# Altium footprint library MP26028EQ-LF-Z.PcbLib: 3 footprints
Each footprint in its own frame and in the unit in brackets; x right, y up, seen from the top. Pads: shape width x height; smd on the part's side, far side on the other; paste and mask are expansions set on the pad; w line width, h text height; cw(c..) or ccw(c..) is an arc to the next point about the centre after c.
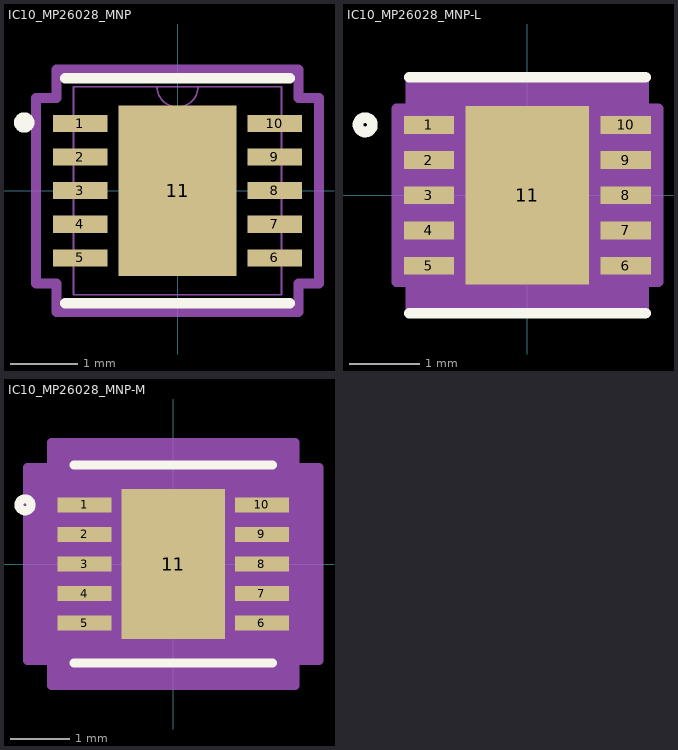
[diagram p0: the footprints below, top view; thin cyan lines are the x and y axes]

## IC10_MP26028_MNP [mil]
pads (11):
  rect 32x10 smd: 1(-57,39.37) 2(-57,19.68) 3(-57,0) 4(-57,-19.68) 5(-57,-39.37) 6(57,-39.37) 7(57,-19.68) 8(57,0) 9(57,19.68) 10(57,39.37)
  rect 69x100 smd: 11(0,0)
Top Overlay:
  circle w6: c-90,40 r3
  lines w6: -66,-66 66,-66 ; -66,66 66,66
Mechanical 13:
  lines w1: -12,61 ccw(c0,61) 12,61 ; -61,-61 -61,61 61,61 61,-61 -61,-61
Mechanical 15:
  lines w6: -83,-54.37 -71,-54.37 -71,-71 71,-71 71,-54.37 83,-54.37 83,54.37 71,54.37 71,71 -71,71 -71,54.37 -83,54.37 -83,-54.37
3D body "IC10_MP26028_MNP.step": height 39.09, standoff 0, extent -60.98,-60.98 60.98,60.98

## IC10_MP26028_MNP-L [mil]
pads (11):
  rect 28x10 smd paste+0 mask+0: 1(-55,39.37) 2(-55,19.68) 3(-55,0) 4(-55,-19.68) 5(-55,-39.37) 6(55,-39.37) 7(55,-19.68) 8(55,0) 9(55,19.68) 10(55,39.37)
  rect 69x100 smd paste+0 mask+0: 11(0,0)
Top Overlay:
  circle w6: c-90.69,39.37 r4
  lines w6: -66,-66 66,-66 ; -66,66 66,66
  text ".Designator" at -137.5,-25 h50
Top Paste:
  region: 30.56,46.06 -30.56,46.06 -30.56,3.94 30.56,3.94
  region: 30.56,-3.94 -30.56,-3.94 -30.56,-46.06 30.56,-46.06
Mechanical 13:
  circle w1: c-41,39.37 r3
  lines w1: -12,61 ccw(c0,61) 12,61 ; -61,-61 61,-61 61,61 -61,61 -61,-61
  text ".Designator" at -137.5,-25 h50
Mechanical 15:
  region: -65,-48.37 -73,-48.37 -73,48.37 -65,48.37 -65,65 65,65 65,48.37 73,48.37 73,-48.37 65,-48.37 65,-65 -65,-65
  lines w6: -73,-48.37 -73,48.37 -65,48.37 -65,65 65,65 65,48.37 73,48.37 73,-48.37 65,-48.37 65,-65 -65,-65 -65,-48.37 -73,-48.37
3D body "IC10_MP26028_MNP.step": height 39.09, standoff 0, extent -60.98,-60.98 60.98,60.98

## IC10_MP26028_MNP-M [mil]
pads (11):
  rect 36x10 smd paste+0 mask+0: 1(-59,39.37) 2(-59,19.68) 3(-59,0) 4(-59,-19.68) 5(-59,-39.37) 6(59,-39.37) 7(59,-19.68) 8(59,0) 9(59,19.68) 10(59,39.37)
  rect 69x100 smd paste+0 mask+0: 11(0,0)
Top Overlay:
  circle w6: c-98.69,39.37 r4
  lines w6: -66,-66 66,-66 ; -66,66 66,66
  text ".Designator" at -137.5,-25 h50
Top Paste:
  region: 30.56,46.06 -30.56,46.06 -30.56,3.94 30.56,3.94
  region: 30.56,-3.94 -30.56,-3.94 -30.56,-46.06 30.56,-46.06
Mechanical 13:
  circle w1: c-41,39.37 r3
  lines w1: -12,61 ccw(c0,61) 12,61 ; -61,-61 61,-61 61,61 -61,61 -61,-61
  text ".Designator" at -137.5,-25 h50
Mechanical 15:
  region: -81,-64.37 -97,-64.37 -97,64.37 -81,64.37 -81,81 81,81 81,64.37 97,64.37 97,-64.37 81,-64.37 81,-81 -81,-81
  lines w6: -97,-64.37 -97,64.37 -81,64.37 -81,81 81,81 81,64.37 97,64.37 97,-64.37 81,-64.37 81,-81 -81,-81 -81,-64.37 -97,-64.37
3D body "IC10_MP26028_MNP.step": height 39.09, standoff 0, extent -60.98,-60.98 60.98,60.98